# Altium footprint library Connectors.PcbLib: 319 footprints (part 19 of 20)
Each footprint in its own frame and in the unit in brackets; x right, y up, seen from the top. Pads: shape width x height; smd on the part's side, far side on the other; paste and mask are expansions set on the pad; w line width, h text height; cw(c..) or ccw(c..) is an arc to the next point about the centre after c.
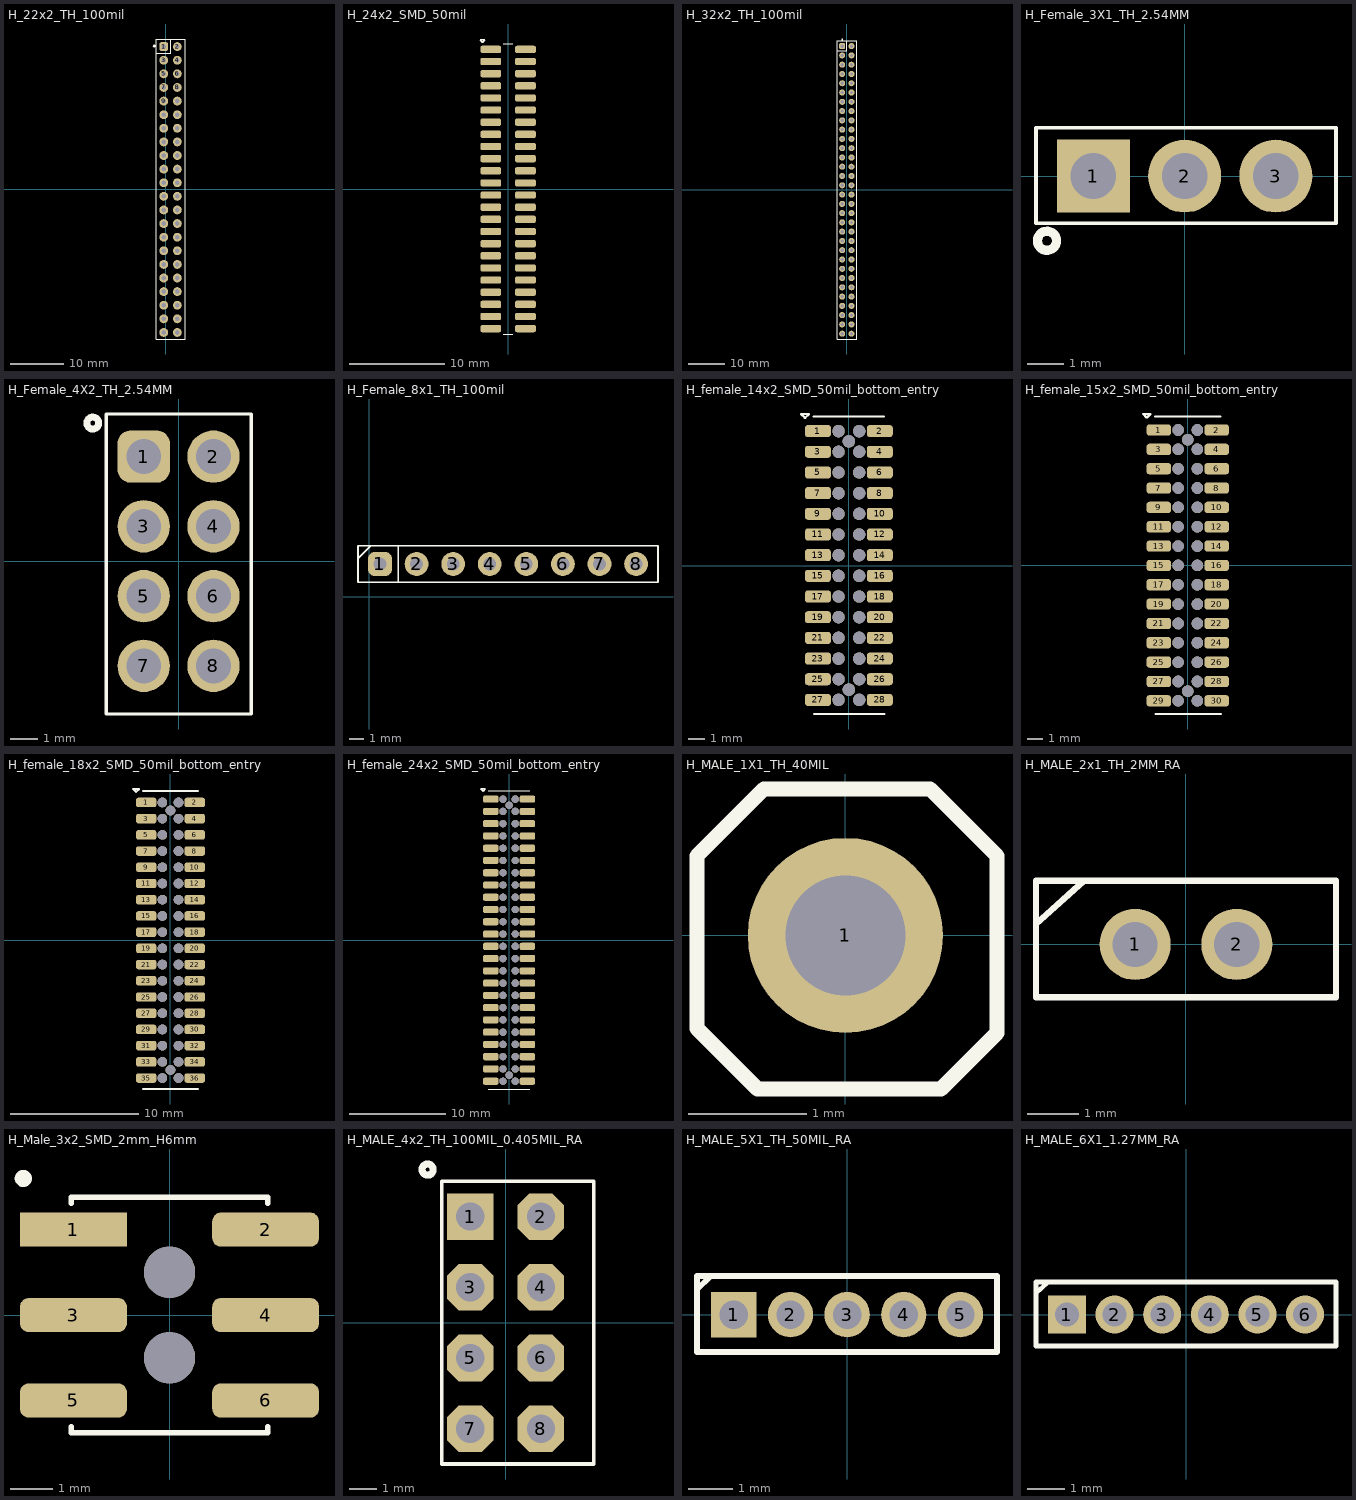
[diagram p18: the footprints below, top view; thin cyan lines are the x and y axes]

## H_22x2_TH_100mil [mil] "Header 100 Mil / 20200309/N-A.Potosi"
pads (45):
  rrect50% 65x65 hole 35: 1(-14.59,1047.79)
  round 65 hole 35: 2(85.41,1047.79) 3(-14.59,947.79) 4(85.41,947.79) 5(-14.59,847.79) 6(85.41,847.79) 7(-14.59,747.79) 8(85.41,747.79) 9(-14.59,647.79) 10(85.41,647.79) 11(-14.59,547.79) 12(85.41,547.79) 13(-14.59,447.79) 14(85.41,447.79) 15(-14.59,347.79) 16(85.41,347.79) 17(-14.59,247.79) 18(85.41,247.79) 19(-14.59,147.79) 20(85.41,147.79) 21(-14.59,47.79) 22(85.41,47.79) 23(-14.59,-52.21) 24(85.41,-52.21) 25(-14.59,-152.21) 26(85.41,-152.21) 27(-14.59,-252.21) 28(85.41,-252.21) 29(-14.59,-352.21) 30(85.41,-352.21) 31(-14.59,-452.21) 32(85.41,-452.21) 33(-14.59,-552.21) 34(85.41,-552.21) 35(-14.59,-652.21) 36(85.41,-652.21) 37(-14.59,-752.21) 38(85.41,-752.21) 39(-14.59,-852.21) 40(85.41,-852.21) 41(-14.59,-952.21) 42(85.41,-952.21) 43(-14.59,-1052.21) 44(85.41,-1052.21)
  round 20 on Top Overlay: ""(-85.41,1052.21)
Top Overlay:
  lines w5: -68.59,997.79 35.41,997.79 35.41,1103.79 ; -68.59,-1100.24 143.41,-1100.24 143.41,1103.79 -68.59,1103.79 -68.59,-1100.24
3D body "Pin Header 1x2 TH Pitch 2.54mm.stp": height 373.85, standoff -125.98, extent -64.59,997.8 135.41,1097.8
3D body "Pin Header 1x2 TH Pitch 2.54mm.stp": height 373.85, standoff -125.98, extent -64.59,897.8 135.41,997.8
3D body "Pin Header 1x2 TH Pitch 2.54mm.stp": height 373.85, standoff -125.98, extent -64.59,797.8 135.41,897.8
3D body "Pin Header 1x2 TH Pitch 2.54mm.stp": height 373.85, standoff -125.98, extent -64.59,697.8 135.41,797.8
3D body "Pin Header 1x2 TH Pitch 2.54mm.stp": height 373.85, standoff -125.98, extent -64.59,597.8 135.41,697.8
3D body "Pin Header 1x2 TH Pitch 2.54mm.stp": height 373.85, standoff -125.98, extent -64.59,497.8 135.41,597.8
3D body "Pin Header 1x2 TH Pitch 2.54mm.stp": height 373.85, standoff -125.98, extent -64.59,397.8 135.41,497.8
3D body "Pin Header 1x2 TH Pitch 2.54mm.stp": height 373.85, standoff -125.98, extent -64.59,297.8 135.41,397.8
3D body "Pin Header 1x2 TH Pitch 2.54mm.stp": height 373.85, standoff -125.98, extent -64.59,197.8 135.41,297.8
3D body "Pin Header 1x2 TH Pitch 2.54mm.stp": height 373.85, standoff -125.98, extent -64.59,97.8 135.41,197.8
3D body "Pin Header 1x2 TH Pitch 2.54mm.stp": height 373.85, standoff -125.98, extent -64.59,-2.2 135.41,97.8
3D body "Pin Header 1x2 TH Pitch 2.54mm.stp": height 373.85, standoff -125.98, extent -64.59,-102.2 135.41,-2.2
3D body "Pin Header 1x2 TH Pitch 2.54mm.stp": height 373.85, standoff -125.98, extent -64.59,-202.2 135.41,-102.2
3D body "Pin Header 1x2 TH Pitch 2.54mm.stp": height 373.85, standoff -125.98, extent -64.59,-302.2 135.41,-202.2
3D body "Pin Header 1x2 TH Pitch 2.54mm.stp": height 373.85, standoff -125.98, extent -64.59,-402.2 135.41,-302.2
3D body "Pin Header 1x2 TH Pitch 2.54mm.stp": height 373.85, standoff -125.98, extent -64.59,-502.2 135.41,-402.2
3D body "Pin Header 1x2 TH Pitch 2.54mm.stp": height 373.85, standoff -125.98, extent -64.59,-602.2 135.41,-502.2
3D body "Pin Header 1x2 TH Pitch 2.54mm.stp": height 373.85, standoff -125.98, extent -64.59,-702.2 135.41,-602.2
3D body "Pin Header 1x2 TH Pitch 2.54mm.stp": height 373.85, standoff -125.98, extent -64.59,-802.2 135.41,-702.2
3D body "Pin Header 1x2 TH Pitch 2.54mm.stp": height 373.85, standoff -125.98, extent -64.59,-902.2 135.41,-802.2
3D body "Pin Header 1x2 TH Pitch 2.54mm.stp": height 373.85, standoff -125.98, extent -64.59,-1002.2 135.41,-902.2
3D body "Pin Header 1x2 TH Pitch 2.54mm.stp": height 373.85, standoff -125.98, extent -64.59,-1102.2 135.41,-1002.2

## H_24x2_SMD_50mil [mm] "/ 20220119 / C-D Viveros"
pads (48):
  rrect50% 2.17x0.76 smd paste+0 mask+0.05: 1(-1.81,14.605) 2(1.81,14.605) 3(-1.81,13.335) 4(1.81,13.335) 5(-1.81,12.065) 6(1.81,12.065) 7(-1.81,10.795) 8(1.81,10.795) 9(-1.81,9.525) 10(1.81,9.525) 11(-1.81,8.255) 12(1.81,8.255) 13(-1.81,6.985) 14(1.81,6.985) 15(-1.81,5.715) 16(1.81,5.715) 17(-1.81,4.445) 18(1.81,4.445) 19(-1.81,3.175) 20(1.81,3.175) 21(-1.81,1.905) 22(1.81,1.905) 23(-1.81,0.635) 24(1.81,0.635) 25(-1.81,-0.635) 26(1.81,-0.635) 27(-1.81,-1.905) 28(1.81,-1.905) 29(-1.81,-3.175) 30(1.81,-3.175) 31(-1.81,-4.445) 32(1.81,-4.445) 33(-1.81,-5.715) 34(1.81,-5.715) 35(-1.81,-6.985) 36(1.81,-6.985) 37(-1.81,-8.255) 38(1.81,-8.255) 39(-1.81,-9.525) 40(1.81,-9.525) 41(-1.81,-10.795) 42(1.81,-10.795) 43(-1.81,-12.065) 44(1.81,-12.065) 45(-1.81,-13.335) 46(1.81,-13.335) 47(-1.81,-14.605) 48(1.81,-14.605)
Top Overlay:
  lines w0.127: -0.504,-15.176 0.504,-15.176 ; -0.504,15.177 0.504,15.177
  lines w0.152: -2.698,15.375 -2.677,15.375 ; -2.698,15.375 -2.677,15.375 ; -2.698,15.375 -2.927,15.605 -2.448,15.605 -2.677,15.375
3D body "BD095-48A-A0-0300-0050-0570-L-B.stp": height 5.01, standoff 0.01, extent -2.85,-15.24 2.85,15.24

## H_32x2_TH_100mil [mil] "/ 20200525/ J-P.Vargas.A"
pads (64):
  rrect50% 65x65 hole 35: 1(-50,1550)
  round 65 hole 35: 2(50,1550) 3(-50,1450) 4(50,1450) 5(-50,1350) 6(50,1350) 7(-50,1250) 8(50,1250) 9(-50,1150) 10(50,1150) 11(-50,1050) 12(50,1050) 13(-50,950) 14(50,950) 15(-50,850) 16(50,850) 17(-50,750) 18(50,750) 19(-50,650) 20(50,650) 21(-50,550) 22(50,550) 23(-50,450) 24(50,450) 25(-50,350) 26(50,350) 27(-50,250) 28(50,250) 29(-50,150) 30(50,150) 31(-50,50) 32(50,50) 33(-50,-50) 34(50,-50) 35(-50,-150) 36(50,-150) 37(-50,-250) 38(50,-250) 39(-50,-350) 40(50,-350) 41(-50,-450) 42(50,-450) 43(-50,-550) 44(50,-550) 45(-50,-650) 46(50,-650) 47(-50,-750) 48(50,-750) 49(-50,-850) 50(50,-850) 51(-50,-950) 52(50,-950) 53(-50,-1050) 54(50,-1050) 55(-50,-1150) 56(50,-1150) 57(-50,-1250) 58(50,-1250) 59(-50,-1350) 60(50,-1350) 61(-50,-1450) 62(50,-1450) 63(-50,-1550) 64(50,-1550)
Top Overlay:
  circle w5: c-50,1622 r4.92
  lines w5: -104,1500 0,1500 0,1606 ; -104,-1607 -104,1606 108,1606 108,-1607 -104,-1607
3D body "female_header_a-bl254-dg-z64d.stp": height 335.15, standoff -125.48, extent -96.43,-1603.84 100.43,1606

## H_Female_3X1_TH_2.54MM [mil] "/20210901/N-A.Potosi"
pads (3):
  rect 80x80 hole 50: 1(-100,0)
  round 80 hole 50: 2(0,0) 3(100,0)
Top Overlay:
  circle w10: c-151,-71 r10.44
  lines w3.94: -163,-52 166,-52 166,53 -163,53 -163,-52
3D body "3-Pin Header - Female - 2.54mm.step": height 185.54, standoff -129.42, extent -158.84,-48.43 160.84,50

## H_Female_4X2_TH_2.54MM [mm] "/20210901/N-A.Potosi"
pads (8):
  rrect50% 1.905x1.905 hole 1.27: 1(-1.27,3.81)
  round 1.905 hole 1.27: 2(1.27,3.81) 3(-1.27,1.27) 4(1.27,1.27) 5(-1.27,-1.27) 6(1.27,-1.27) 7(-1.27,-3.81) 8(1.27,-3.81)
Top Overlay:
  circle w0.254: c-3.124,5.03 r0.217
  lines w0.127: -2.642,-5.562 2.642,-5.562 2.642,5.36 -2.642,5.36 -2.642,-5.562
3D body "8-Pin Header - Female - Double - 2.54mm.step": height 8.5, standoff -3, extent -2.5,-5.41 2.5,5.25

## H_Female_8x1_TH_100mil [mil] "/ 20231112 / J.Jaramillo"
pads (8):
  rrect50% 65x65 hole 35: 1(30,90)
  round 65 hole 35: 2(130,90) 3(230,90) 4(330,90) 5(430,90) 6(530,90) 7(630,90) 8(730,90)
Top Overlay:
  lines w5: -29.76,105.92 3.13,138.82 ; 80,40 80,140 ; -30.09,40 -30.09,140 789.91,140 789.91,40 -30.09,40
3D body "PPTC081LFBN-RC--3DModel-STEP-56544.STEP": height 335, standoff -126, extent -30.09,40.46 789.91,140.46

## H_female_14x2_SMD_50mil_bottom_entry [mil] "/ 20220120/ N-A.potosi"
pads (58):
  rrect50% 62.99x29.13 smd: 1(-74.79,325) 2(74.79,325) 3(-74.79,275) 4(74.79,275) 5(-74.79,225) 6(74.79,225) 7(-74.79,175) 8(74.79,175) 9(-74.79,125) 10(74.79,125) 11(-74.79,75) 12(74.79,75) 13(-74.79,25) 14(74.79,25) 15(-74.79,-25) 16(74.79,-25) 17(-74.79,-75) 18(74.79,-75) 19(-74.79,-125) 20(74.79,-125) 21(-74.79,-175) 22(74.79,-175) 23(-74.79,-225) 24(74.79,-225) 25(-74.79,-275) 26(74.79,-275) 27(-74.79,-325) 28(74.79,-325)
  round 30 hole 30 unplated: ""(-25,-325) ""(-25,-275) ""(-25,-225) ""(-25,-175) ""(-25,-125) ""(-25,-75) ""(-25,-25) ""(-25,25) ""(-25,75) ""(-25,125) ""(-25,175) ""(-25,225) ""(-25,275) ""(-25,325) ""(0,-300) ""(0,300) ""(25,-325) ""(25,-275) ""(25,-225) ""(25,-175) ""(25,-125) ""(25,-75) ""(25,-25) ""(25,25) ""(25,75) ""(25,125) ""(25,175) ""(25,225) ""(25,275) ""(25,325)
Top Overlay:
  lines w5: -85,360.24 85,360.24 ; -83.91,-359.05 86.09,-359.05
  lines w6: -106.21,357.33 -105.39,357.33 ; -106.21,357.33 -105.39,357.33 ; -106.21,357.33 -115.25,366.37 -96.36,366.37 -105.39,357.33
Bottom Overlay:
  circle w10: c-62.99,325 r9.06
3D body "CLP-114-02-F-D-BE-K-TR.stp": height 95.5, standoff 0.5, extent -83.91,-359.05 86.09,357.95
3D body: height 0, standoff 0, extent -9.76,290.18 9.85,309.83
3D body: height 0, standoff 0, extent -9.76,-309.82 9.85,-290.17

## H_female_15x2_SMD_50mil_bottom_entry [mil] "/ 20220909/ N-A.potosi"
pads (62):
  rrect50% 62.99x29.13 smd: 1(-74.79,350) 2(74.79,350) 3(-74.79,300) 4(74.79,300) 5(-74.79,250) 6(74.79,250) 7(-74.79,200) 8(74.79,200) 9(-74.79,150) 10(74.79,150) 11(-74.79,100) 12(74.79,100) 13(-74.79,50) 14(74.79,50) 15(-74.79,0) 16(74.79,0) 17(-74.79,-50) 18(74.79,-50) 19(-74.79,-100) 20(74.79,-100) 21(-74.79,-150) 22(74.79,-150) 23(-74.79,-200) 24(74.79,-200) 25(-74.79,-250) 26(74.79,-250) 27(-74.79,-300) 28(74.79,-300) 29(-74.79,-350) 30(74.79,-350)
  round 30 hole 30 unplated: ""(-25,-350) ""(-25,-300) ""(-25,-250) ""(-25,-200) ""(-25,-150) ""(-25,-100) ""(-25,-50) ""(-25,0) ""(-25,50) ""(-25,100) ""(-25,150) ""(-25,200) ""(-25,250) ""(-25,300) ""(-25,350) ""(0,-325) ""(0,325) ""(25,-350) ""(25,-300) ""(25,-250) ""(25,-200) ""(25,-150) ""(25,-100) ""(25,-50) ""(25,0) ""(25,50) ""(25,100) ""(25,150) ""(25,200) ""(25,250) ""(25,300) ""(25,350)
Top Overlay:
  lines w5: -85,385.24 85,385.24 ; -83.91,-384.05 86.09,-384.05
  lines w6: -106.21,382.33 -105.39,382.33 ; -106.21,382.33 -105.39,382.33 ; -106.21,382.33 -115.25,391.37 -96.36,391.37 -105.39,382.33
Bottom Overlay:
  circle w10: c-62.99,350 r9.06
3D body "BD050-30-A-1-0500-L-B.stp": height 85.14, standoff -29.03, extent -98.83,-380.19 98.42,379.26

## H_female_18x2_SMD_50mil_bottom_entry [mil] "/ 20220121/ N-A.potosi"
pads (74):
  rrect50% 62.99x29.13 smd: 1(-74.79,425) 2(74.79,425) 3(-74.79,375) 4(74.79,375) 5(-74.79,325) 6(74.79,325) 7(-74.79,275) 8(74.79,275) 9(-74.79,225) 10(74.79,225) 11(-74.79,175) 12(74.79,175) 13(-74.79,125) 14(74.79,125) 15(-74.79,75) 16(74.79,75) 17(-74.79,25) 18(74.79,25) 19(-74.79,-25) 20(74.79,-25) 21(-74.79,-75) 22(74.79,-75) 23(-74.79,-125) 24(74.79,-125) 25(-74.79,-175) 26(74.79,-175) 27(-74.79,-225) 28(74.79,-225) 29(-74.79,-275) 30(74.79,-275) 31(-74.79,-325) 32(74.79,-325) 33(-74.79,-375) 34(74.79,-375) 35(-74.79,-425) 36(74.79,-425)
  round 30 hole 30 unplated: ""(-25,-425) ""(-25,-375) ""(-25,-325) ""(-25,-275) ""(-25,-225) ""(-25,-175) ""(-25,-125) ""(-25,-75) ""(-25,-25) ""(-25,25) ""(-25,75) ""(-25,125) ""(-25,175) ""(-25,225) ""(-25,275) ""(-25,325) ""(-25,375) ""(-25,425) ""(0,-400) ""(0,400) ""(25,-425) ""(25,-375) ""(25,-325) ""(25,-275) ""(25,-225) ""(25,-175) ""(25,-125) ""(25,-75) ""(25,-25) ""(25,25) ""(25,75) ""(25,125) ""(25,175) ""(25,225) ""(25,275) ""(25,325) ""(25,375) ""(25,425)
Top Overlay:
  lines w5: -85.11,-458.65 84.89,-458.65 ; -85,460.24 85,460.24
  lines w6: -106.21,457.33 -115.25,466.37 -96.36,466.37 -105.39,457.33 ; -106.21,457.33 -105.39,457.33 ; -106.21,457.33 -105.39,457.33
Bottom Overlay:
  circle w10: c-62.99,425 r9.06
3D body: height 0, standoff 0, extent -9.76,-409.82 9.85,-390.17
3D body: height 0, standoff 0, extent -9.76,390.18 9.85,409.83
3D body "CLP-118-02-F-D-BE-K-TR.stp": height 95.5, standoff 0.5, extent -85.11,-458.65 84.89,458.35

## H_female_24x2_SMD_50mil_bottom_entry [mil] "/ 20220121/ N-A.potosi"
pads (98):
  rrect50% 62.99x29.13 smd: 1(-74.79,575) 2(74.79,575) 3(-74.79,525) 4(74.79,525) 5(-74.79,475) 6(74.79,475) 7(-74.79,425) 8(74.79,425) 9(-74.79,375) 10(74.79,375) 11(-74.79,325) 12(74.79,325) 13(-74.79,275) 14(74.79,275) 15(-74.79,225) 16(74.79,225) 17(-74.79,175) 18(74.79,175) 19(-74.79,125) 20(74.79,125) 21(-74.79,75) 22(74.79,75) 23(-74.79,25) 24(74.79,25) 25(-74.79,-25) 26(74.79,-25) 27(-74.79,-75) 28(74.79,-75) 29(-74.79,-125) 30(74.79,-125) 31(-74.79,-175) 32(74.79,-175) 33(-74.79,-225) 34(74.79,-225) 35(-74.79,-275) 36(74.79,-275) 37(-74.79,-325) 38(74.79,-325) 39(-74.79,-375) 40(74.79,-375) 41(-74.79,-425) 42(74.79,-425) 43(-74.79,-475) 44(74.79,-475) 45(-74.79,-525) 46(74.79,-525) 47(-74.79,-575) 48(74.79,-575)
  round 30 hole 30 unplated: ""(-25,-575) ""(-25,-525) ""(-25,-475) ""(-25,-425) ""(-25,-375) ""(-25,-325) ""(-25,-275) ""(-25,-225) ""(-25,-175) ""(-25,-125) ""(-25,-75) ""(-25,-25) ""(-25,25) ""(-25,75) ""(-25,125) ""(-25,175) ""(-25,225) ""(-25,275) ""(-25,325) ""(-25,375) ""(-25,425) ""(-25,475) ""(-25,525) ""(-25,575) ""(0,-550) ""(0,550) ""(25,-575) ""(25,-525) ""(25,-475) ""(25,-425) ""(25,-375) ""(25,-325) ""(25,-275) ""(25,-225) ""(25,-175) ""(25,-125) ""(25,-75) ""(25,-25) ""(25,25) ""(25,75) ""(25,125) ""(25,175) ""(25,225) ""(25,275) ""(25,325) ""(25,375) ""(25,425) ""(25,475) ""(25,525) ""(25,575)
Top Overlay:
  lines w5: -85,-606.76 85,-606.76 ; -85,610.24 85,610.24
  lines w6: -106.21,607.33 -115.25,616.37 -96.36,616.37 -105.39,607.33 ; -106.21,607.33 -105.39,607.33 ; -106.21,607.33 -105.39,607.33
Bottom Overlay:
  circle w10: c-62.99,575 r9.06
3D body: height 0, standoff 0, extent -9.76,-559.82 9.85,-540.17
3D body: height 0, standoff 0, extent -9.76,540.18 9.85,559.83
3D body "CLP-124-02-F-D-BE-K-TR.stp": height 95.5, standoff 0.5, extent -85.71,-608.79 84.29,608.21

## H_MALE_1X1_TH_40MIL [mil] "20221108 / E.Naranjo"
pads (1):
  round 65 hole 40: 1(0,0)
Top Overlay:
  lines w5: -49.45,-30.99 -49.45,26.53 -27.19,48.8 28.28,48.8 50.55,26.53 50.55,-32.5 31.84,-51.2 -29.24,-51.2 -49.45,-30.99
3D body "PREC001SAAN-RC.STEP": height 330.42, standoff -119.58, extent -49.45,-51.2 50.55,48.8

## H_MALE_2x1_TH_2MM_RA [mil] "20220516 / E.Naranjo"
pads (2):
  round 55 hole 35: 1(-39.37,0) 2(39.37,0)
Top Overlay:
  lines w5: -116.14,15.75 -79.04,49.22 ; -116.14,-40.78 -116.14,49.22 116.15,49.22 116.15,-40.78 -116.14,-40.78
3D body "SWR201-NRTN-S02-RL-WH--3DModel-STEP-56544.STEP": height 189.47, standoff -134.37, extent -116.14,-253.93 116.15,49.22

## H_Male_3x2_SMD_2mm_H6mm [mm] "/20230621/J-A.Sepulveda"
pads (8):
  rect 2.5x0.8 smd: 1(-2.25,2)
  rrect50% 2.5x0.8 smd: 2(2.25,2) 3(-2.25,0) 4(2.25,0) 5(-2.25,-2) 6(2.25,-2)
  round 1.2 hole 1.2 unplated: ""(0,-1) ""(0,1)
Top Overlay:
  circle w0.2: c-3.425,3.2 r0.1
  lines w0.127: -2.3,-2.62 -2.3,-2.76 2.3,-2.76 2.3,-2.62 ; -2.3,2.62 -2.3,2.76 2.3,2.76 2.3,2.62
3D body "PH2.0x1.5-2x3T B3.9 W6.5 E2.1.stp": height 6.02, standoff -1.34, extent -3.25,-3 3.25,3

## H_MALE_4x2_TH_100MIL_0.405MIL_RA [mil] "A-F. Romo / 20221019"
pads (8):
  rect 66x66 hole 40: 1(-50,150)
  oct 66x66 hole 40: 2(50,150) 3(-50,50) 4(50,50) 5(-50,-50) 6(50,-50) 7(-50,-150) 8(50,-150)
Top Overlay:
  circle w10: c-110.24,216.54 r7.87
  lines w5: -90,-200 125,-200 125,200 -90,200 -90,-200
3D body "929838-02-04.STEP": height 283.18, standoff -234.54, extent -90,-200 530.08,200

## H_MALE_5X1_TH_50MIL_RA [mil] "20220518 / E.Naranjo"
pads (5):
  rect 40x40 hole 25: 1(-100,0)
  round 40 hole 25: 2(-50,0) 3(0,0) 4(50,0) 5(100,0)
Top Overlay:
  lines w5: -132.48,22.5 -120,34 ; -132.48,-32.93 132.28,-32.93 132.28,34 -132.48,34 -132.48,-32.93
3D body "M50-3930542.STEP": height 83.18, standoff -93.99, extent -125.05,-7.87 125.05,216.54

## H_MALE_6X1_1.27MM_RA [mil] "20220516 / E.Naranjo"
pads (6):
  rect 40x40 hole 25: 1(-125,0)
  round 40 hole 25: 2(-75,0) 3(-25,0) 4(25,0) 5(75,0) 6(125,0)
Top Overlay:
  lines w5: -157.48,22.5 -145,34 ; -157.48,-32.93 -157.48,34 157.48,34 157.48,-32.93 -157.48,-32.93
3D body "M50-3930642.STEP": height 83.18, standoff -93.99, extent -150.66,-7.99 149.44,216.42